# Altium schematic symbol library ACQ_FE_VREG.SchLib: 17 symbols
Pins are listed as number, name and electrical type; pins without a type are passive.

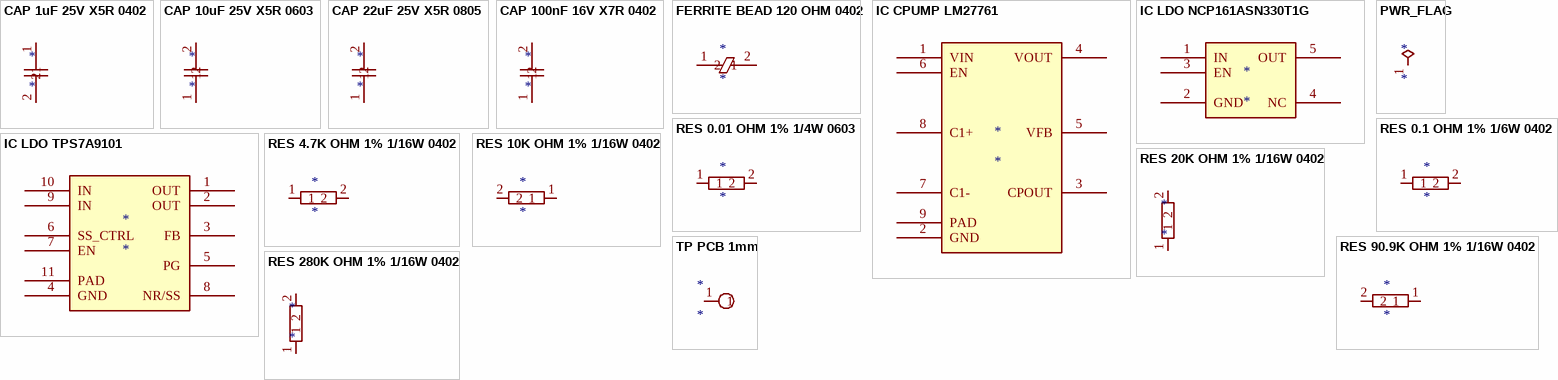
[diagram p0: symbols CAP 1uF 25V X5R 0402 to TP PCB 1mm]

## CAP 1uF 25V X5R 0402
designator *
pins: 1, 2

## CAP 10uF 25V X5R 0603
designator *
pins: 1, 2

## CAP 22uF 25V X5R 0805
designator *
pins: 1, 2

## CAP 100nF 16V X7R 0402
designator *
pins: 1, 2

## FERRITE BEAD 120 OHM 0402
designator *
pins: 1, 2

## IC CPUMP LM27761
designator *
pins: 1 VIN, 2 GND, 3 CPOUT, 4 VOUT, 5 VFB, 6 EN, 7 C1-, 8 C1+, 9 PAD

## IC LDO NCP161ASN330T1G
designator *
pins: 1 IN, 2 GND, 3 EN, 4 NC, 5 OUT

## IC LDO TPS7A9101
designator *
pins: 1 OUT, 2 OUT, 3 FB, 4 GND, 5 PG, 6 SS_CTRL, 7 EN, 8 NR/SS, 9 IN, 10 IN, 11 PAD

## PWR_FLAG
designator *  (graphical)
pins: 1

## RES 0.01 OHM 1% 1/4W 0603
designator *
pins: 1, 2

## RES 0.1 OHM 1% 1/6W 0402
designator *
pins: 1, 2

## RES 4.7K OHM 1% 1/16W 0402
designator *
pins: 1, 2

## RES 10K OHM 1% 1/16W 0402
designator *
pins: 1, 2

## RES 20K OHM 1% 1/16W 0402
designator *
pins: 1, 2

## RES 90.9K OHM 1% 1/16W 0402
designator *
pins: 1, 2

## RES 280K OHM 1% 1/16W 0402
designator *
pins: 1, 2

## TP PCB 1mm
designator *
pins: 1